# EAGLE library part LGA-128_UNKNOWN_MODULE (library dp_devices.v6)
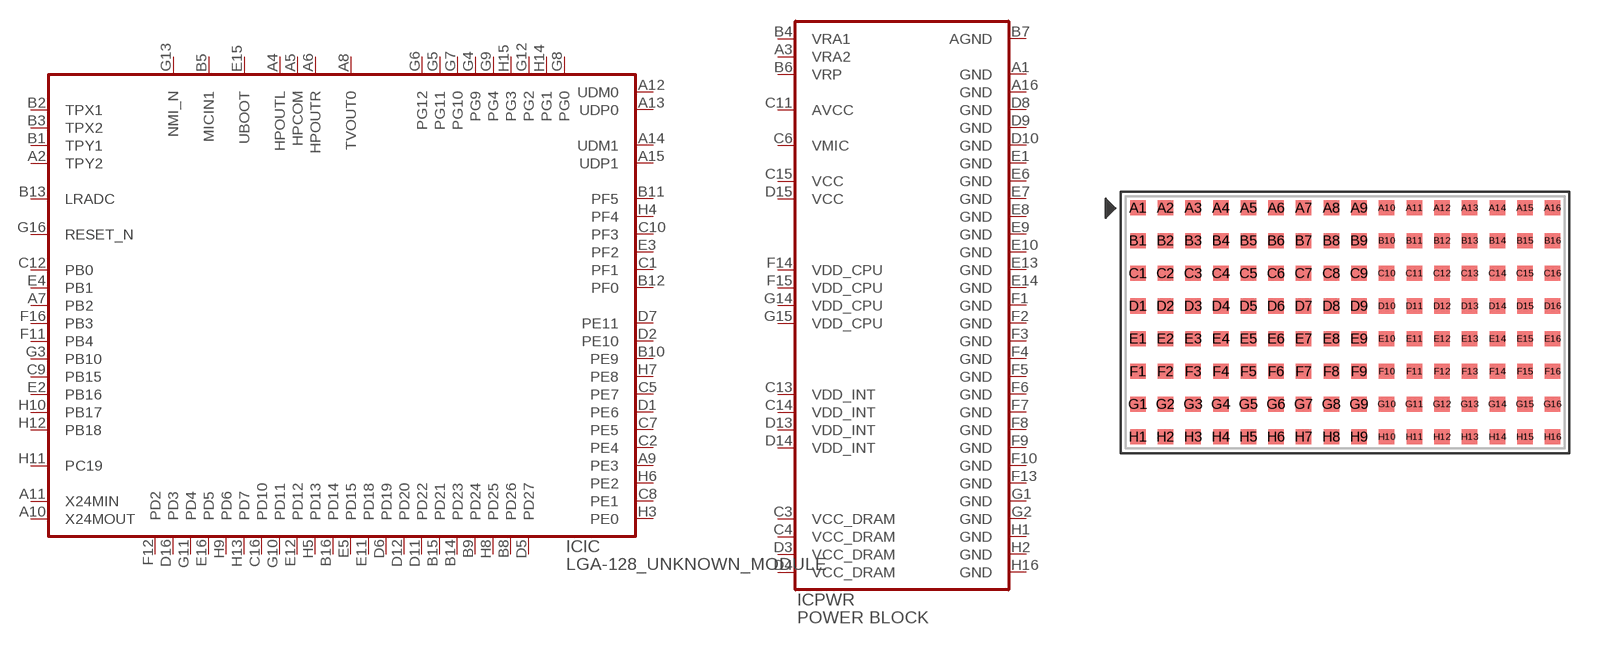
[diagram p158: symbol with the pads of LGA-128_23.5X13.5; footprint LGA-128_23.5X13.5]

Designator prefix IC; gates IC=LGA-128_UNKNOWN_MODULE PWR=LGA-128_UNKNOWN_MODULE_PWR

## LGA-128_UNKNOWN_MODULE  [LGA-128_23.5X13.5]
A1  PWR:GND  pwr
A2  IC:TPY2  in
A3  PWR:VRA2  pas
A4  IC:HPOUTL  out
A5  IC:HPCOM  out
A6  IC:HPOUTR  out
A7  IC:PB2
A8  IC:TVOUT0  out
A9  IC:PE3
A10  IC:X24MOUT  out
A11  IC:X24MIN  in
A12  IC:UDM0
A13  IC:UDP0
A14  IC:UDM1
A15  IC:UDP1
A16  PWR:GND  pwr
B1  IC:TPY1  in
B2  IC:TPX1  in
B3  IC:TPX2  in
B4  PWR:VRA1  pas
B5  IC:MICIN1  in
B6  PWR:VRP  pas
B7  PWR:AGND  pwr
B8  IC:PD26
B9  IC:PD24
B10  IC:PE9
B11  IC:PF5
B12  IC:PF0
B13  IC:LRADC  pas
B14  IC:PD23
B15  IC:PD21
B16  IC:PD14
C1  IC:PF1
C2  IC:PE4
C3  PWR:VCC_DRAM  pwr
C4  PWR:VCC_DRAM  pwr
C5  IC:PE7
C6  PWR:VMIC  pwr
C7  IC:PE5
C8  IC:PE1
C9  IC:PB15
C10  IC:PF3
C11  PWR:AVCC  pwr
C12  IC:PB0
C13  PWR:VDD_INT  pwr
C14  PWR:VDD_INT  pwr
C15  PWR:VCC  pwr
C16  IC:PD10
D1  IC:PE6
D2  IC:PE10
D3  PWR:VCC_DRAM  pwr
D4  PWR:VCC_DRAM  pwr
D5  IC:PD27
D6  IC:PD19
D7  IC:PE11
D8  PWR:GND  pwr
D9  PWR:GND  pwr
D10  PWR:GND  pwr
D11  IC:PD22
D12  IC:PD20
D13  PWR:VDD_INT  pwr
D14  PWR:VDD_INT  pwr
D15  PWR:VCC  pwr
D16  IC:PD3
E1  PWR:GND  pwr
E2  IC:PB16
E3  IC:PF2
E4  IC:PB1
E5  IC:PD15
E6  PWR:GND  pwr
E7  PWR:GND  pwr
E8  PWR:GND  pwr
E9  PWR:GND  pwr
E10  PWR:GND  pwr
E11  IC:PD18
E12  IC:PD12
E13  PWR:GND  pwr
E14  PWR:GND  pwr
E15  IC:UBOOT
E16  IC:PD5
F1  PWR:GND  pwr
F2  PWR:GND  pwr
F3  PWR:GND  pwr
F4  PWR:GND  pwr
F5  PWR:GND  pwr
F6  PWR:GND  pwr
F7  PWR:GND  pwr
F8  PWR:GND  pwr
F9  PWR:GND  pwr
F10  PWR:GND  pwr
F11  IC:PB4
F12  IC:PD2
F13  PWR:GND  pwr
F14  PWR:VDD_CPU  pwr
F15  PWR:VDD_CPU  pwr
F16  IC:PB3
G1  PWR:GND  pwr
G2  PWR:GND  pwr
G3  IC:PB10
G4  IC:PG9
G5  IC:PG11
G6  IC:PG12
G7  IC:PG10
G8  IC:PG0
G9  IC:PG4
G10  IC:PD11
G11  IC:PD4
G12  IC:PG2
G13  IC:NMI_N  pas
G14  PWR:VDD_CPU  pwr
G15  PWR:VDD_CPU  pwr
G16  IC:RESET_N  pas
H1  PWR:GND  pwr
H2  PWR:GND  pwr
H3  IC:PE0
H4  IC:PF4
H5  IC:PD13
H6  IC:PE2
H7  IC:PE8
H8  IC:PD25
H9  IC:PD6
H10  IC:PB17
H11  IC:PC19
H12  IC:PB18
H13  IC:PD7
H14  IC:PG1
H15  IC:PG3
H16  PWR:GND  pwr

## Footprint LGA-128_23.5X13.5 (pad centres in mm)
Land Grid Array LGA 128 Body: 23.5 x 13.5 mm Pad: 0.81 x 0.83 mm X - Pitch: 1.48 Y - Pitch: 1.75
smd 0.83 x 0.81: A1 -11.1,6.125; A2 -9.62,6.125; A3 -8.14,6.125; A4 -6.66,6.125; A5 -5.18,6.125; A6 -3.7,6.125; A7 -2.22,6.125; A8 -0.74,6.125; A9 0.74,6.125; A10 2.22,6.125; A11 3.7,6.125; A12 5.18,6.125; A13 6.66,6.125; A14 8.14,6.125; A15 9.62,6.125; A16 11.1,6.125; B1 -11.1,4.375; B2 -9.62,4.375; B3 -8.14,4.375; B4 -6.66,4.375; B5 -5.18,4.375; B6 -3.7,4.375; B7 -2.22,4.375; B8 -0.74,4.375; B9 0.74,4.375; B10 2.22,4.375; B11 3.7,4.375; B12 5.18,4.375; B13 6.66,4.375; B14 8.14,4.375; B15 9.62,4.375; B16 11.1,4.375; C1 -11.1,2.625; C2 -9.62,2.625; C3 -8.14,2.625; C4 -6.66,2.625; C5 -5.18,2.625; C6 -3.7,2.625; C7 -2.22,2.625; C8 -0.74,2.625; C9 0.74,2.625; C10 2.22,2.625; C11 3.7,2.625; C12 5.18,2.625; C13 6.66,2.625; C14 8.14,2.625; C15 9.62,2.625; C16 11.1,2.625; D1 -11.1,0.875; D2 -9.62,0.875; D3 -8.14,0.875; D4 -6.66,0.875; D5 -5.18,0.875; D6 -3.7,0.875; D7 -2.22,0.875; D8 -0.74,0.875; D9 0.74,0.875; D10 2.22,0.875; D11 3.7,0.875; D12 5.18,0.875; D13 6.66,0.875; D14 8.14,0.875; D15 9.62,0.875; D16 11.1,0.875; E1 -11.1,-0.875; E2 -9.62,-0.875; E3 -8.14,-0.875; E4 -6.66,-0.875; E5 -5.18,-0.875; E6 -3.7,-0.875; E7 -2.22,-0.875; E8 -0.74,-0.875; E9 0.74,-0.875; E10 2.22,-0.875; E11 3.7,-0.875; E12 5.18,-0.875; E13 6.66,-0.875; E14 8.14,-0.875; E15 9.62,-0.875; E16 11.1,-0.875; F1 -11.1,-2.625; F2 -9.62,-2.625; F3 -8.14,-2.625; F4 -6.66,-2.625; F5 -5.18,-2.625; F6 -3.7,-2.625; F7 -2.22,-2.625; F8 -0.74,-2.625; F9 0.74,-2.625; F10 2.22,-2.625; F11 3.7,-2.625; F12 5.18,-2.625; F13 6.66,-2.625; F14 8.14,-2.625; F15 9.62,-2.625; F16 11.1,-2.625; G1 -11.1,-4.375; G2 -9.62,-4.375; G3 -8.14,-4.375; G4 -6.66,-4.375; G5 -5.18,-4.375; G6 -3.7,-4.375; G7 -2.22,-4.375; G8 -0.74,-4.375; G9 0.74,-4.375; G10 2.22,-4.375; G11 3.7,-4.375; G12 5.18,-4.375; G13 6.66,-4.375; G14 8.14,-4.375; G15 9.62,-4.375; G16 11.1,-4.375; H1 -11.1,-6.125; H2 -9.62,-6.125; H3 -8.14,-6.125; H4 -6.66,-6.125; H5 -5.18,-6.125; H6 -3.7,-6.125; H7 -2.22,-6.125; H8 -0.74,-6.125; H9 0.74,-6.125; H10 2.22,-6.125; H11 3.7,-6.125; H12 5.18,-6.125; H13 6.66,-6.125; H14 8.14,-6.125; H15 9.62,-6.125; H16 11.1,-6.125